# Altium schematic symbol library SQJQ466E-T1_GE3.SchLib: 1 symbol
Pins are listed as number, name and electrical type; pins without a type are passive.

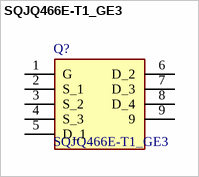
[diagram p0: symbol SQJQ466E-T1_GE3]

## SQJQ466E-T1_GE3
designator Q?
VISHAY - SQJQ466E-T1_GE3 - MOSFET, AEC-Q101, N-CH, 60V, POWERPAK; Geometry.Height: 1.8mm; Manufacturer_Name: Vishay; Manufacturer_Part_Number: SQJQ466E-T1_GE3; Mouser Part Number: 78-SQJQ466E-T1_GE3; Mouser Price/Stock: https://www.mouser.co.uk/ProductDetail/Vishay-Siliconix/SQJQ466E-T1_GE3?qs=5aG0NVq1C4wZZxWgJuXbbg%3D%3D; Arrow Part Number: SQJQ466E-T1_GE3; Arrow Price/Stock: https://www.arrow.com/en/products/sqjq466e-t1-ge3/vishay.html?utm_currency=USD&region=nac; Datasheet Link: https://www.vishay.com/docs/75138/sqjq466e.pdf
footprint SQJQ466ET1_GE3
pins: 1 G, 2 S_1, 3 S_2, 4 S_3, 5 D_1, 6 D_2, 7 D_3, 8 D_4, 9